# Altium footprint library WE-LAN.PcbLib: 48 footprints (part 2 of 3)
Each footprint in its own frame and in the unit in brackets; x right, y up, seen from the top. Pads: shape width x height; smd on the part's side, far side on the other; paste and mask are expansions set on the pad; w line width, h text height; cw(c..) or ccw(c..) is an arc to the next point about the centre after c.
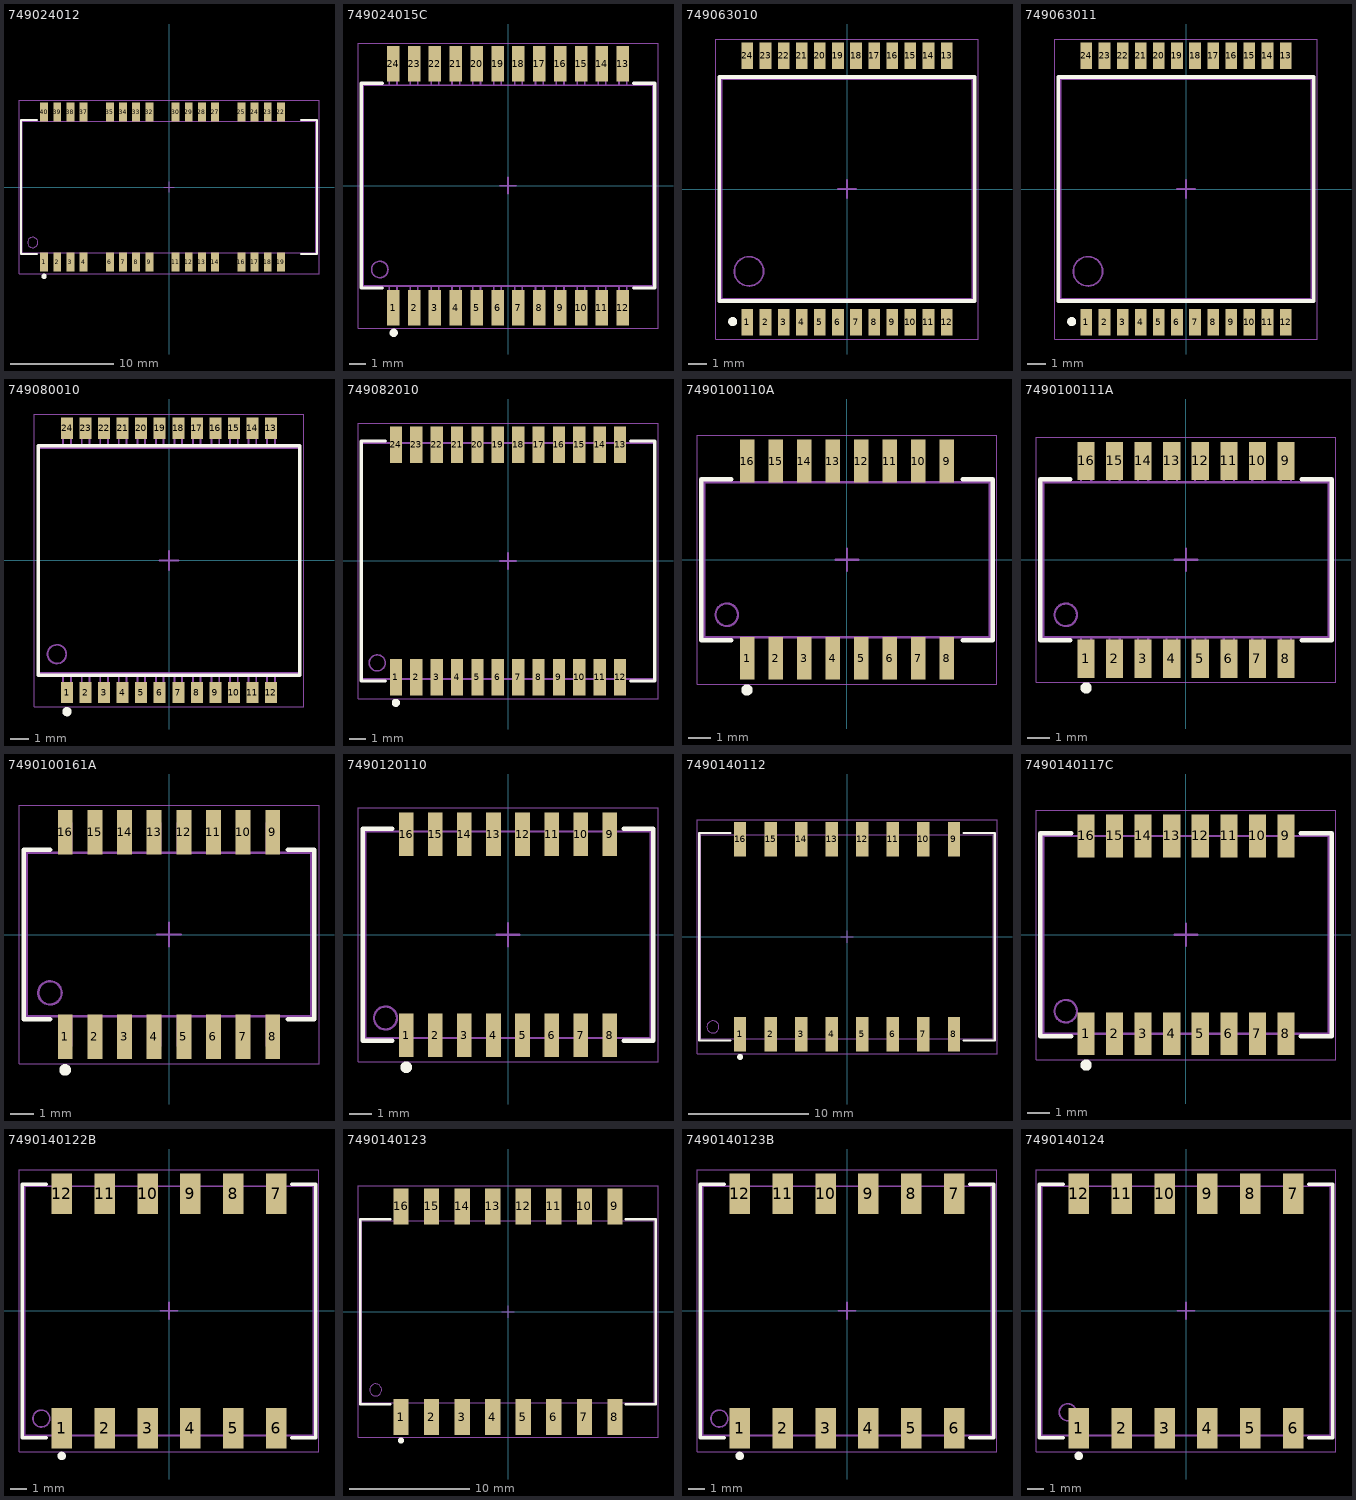
[diagram p1: the footprints below, top view; thin cyan lines are the x and y axes]

## 749024012 [mm] "SMD LAN Transformers, body 28.32x12.7mm, 32-Leads"
height 12.7
pads (32):
  rect 0.76x1.86 smd: 1(-12.06,-7.24) 2(-10.79,-7.24) 3(-9.52,-7.24) 4(-8.25,-7.24) 6(-5.71,-7.24) 7(-4.44,-7.24) 8(-3.17,-7.24) 9(-1.9,-7.24) 11(0.64,-7.24) 12(1.91,-7.24) 13(3.18,-7.24) 14(4.45,-7.24) 16(6.99,-7.24) 17(8.26,-7.24) 18(9.53,-7.24) 19(10.8,-7.24) 22(10.8,7.24) 23(9.53,7.24) 24(8.26,7.24) 25(6.99,7.24) 27(4.45,7.24) 28(3.18,7.24) 29(1.91,7.24) 30(0.64,7.24) 32(-1.9,7.24) 33(-3.17,7.24) 34(-4.44,7.24) 35(-5.71,7.24) 37(-8.25,7.24) 38(-9.52,7.24) 39(-10.79,7.24) 40(-12.06,7.24)
Top Overlay:
  circle w0.25: c-12.06,-8.62 r0.125
  lines w0.2: -12.75,-6.475 -14.285,-6.475 -14.285,6.475 -12.75,6.475 ; 12.75,-6.475 14.285,-6.475 14.285,6.475 12.75,6.475
Top Assembly:
  circle w0.1: c-13.16,-5.35 r0.5
  lines w0.1: -12.285,-6.35 -12.285,-7.745 -11.835,-7.745 -11.835,-6.35 ; -12.285,6.35 -12.285,7.745 -11.835,7.745 -11.835,6.35 ; -11.015,-6.35 -11.015,-7.745 -10.565,-7.745 -10.565,-6.35 ; -11.015,6.35 -11.015,7.745 -10.565,7.745 -10.565,6.35 ; -9.745,-6.35 -9.745,-7.745 -9.295,-7.745 -9.295,-6.35 ; -9.745,6.35 -9.745,7.745 -9.295,7.745 -9.295,6.35 ; -8.475,-6.35 -8.475,-7.745 -8.025,-7.745 -8.025,-6.35 ; -8.475,6.35 -8.475,7.745 -8.025,7.745 -8.025,6.35 ; -5.935,-6.35 -5.935,-7.745 -5.485,-7.745 -5.485,-6.35 ; -5.935,6.35 -5.935,7.745 -5.485,7.745 -5.485,6.35 ; -4.665,-6.35 -4.665,-7.745 -4.215,-7.745 -4.215,-6.35 ; -4.665,6.35 -4.665,7.745 -4.215,7.745 -4.215,6.35 ; -3.395,-6.35 -3.395,-7.745 -2.945,-7.745 -2.945,-6.35 ; -3.395,6.35 -3.395,7.745 -2.945,7.745 -2.945,6.35 ; -2.125,-6.35 -2.125,-7.745 -1.675,-7.745 -1.675,-6.35 ; -2.125,6.35 -2.125,7.745 -1.675,7.745 -1.675,6.35 ; 0.415,-6.35 0.415,-7.745 0.865,-7.745 0.865,-6.35 ; 0.415,6.35 0.415,7.745 0.865,7.745 0.865,6.35 ; 1.685,-6.35 1.685,-7.745 2.135,-7.745 2.135,-6.35 ; 1.685,6.35 1.685,7.745 2.135,7.745 2.135,6.35 ; 2.955,-6.35 2.955,-7.745 3.405,-7.745 3.405,-6.35 ; 2.955,6.35 2.955,7.745 3.405,7.745 3.405,6.35 ; 4.225,-6.35 4.225,-7.745 4.675,-7.745 4.675,-6.35 ; 4.225,6.35 4.225,7.745 4.675,7.745 4.675,6.35 ; 6.765,-6.35 6.765,-7.745 7.215,-7.745 7.215,-6.35 ; 6.765,6.35 6.765,7.745 7.215,7.745 7.215,6.35 ; 8.035,-6.35 8.035,-7.745 8.485,-7.745 8.485,-6.35 ; 8.035,6.35 8.035,7.745 8.485,7.745 8.485,6.35 ; 9.305,-6.35 9.305,-7.745 9.755,-7.745 9.755,-6.35 ; 9.305,6.35 9.305,7.745 9.755,7.745 9.755,6.35 ; 10.575,-6.35 10.575,-7.745 11.025,-7.745 11.025,-6.35 ; 10.575,6.35 10.575,7.745 11.025,7.745 11.025,6.35 ; -14.16,-6.35 -14.16,6.35 14.16,6.35 14.16,-6.35 -14.16,-6.35
Top Designator:
  text ".Designator" at -3.647,-0.357 h1
Top Courtyard:
  lines w0.05: -14.485,-8.37 14.485,-8.37 14.485,8.37 -14.485,8.37 -14.485,-8.37
Top Component Center:
  lines w0.1: -0.5,0 0.5,0 ; 0,-0.5 0,0.5
3D body "749024012.stp": height 12.7, standoff 0, extent -14.285,-7.745 14.285,7.745

## 749024015C [mm] "SMD LAN Transformers, body 17.6x14.2mm, 24-Leads"
height 6
pads (24):
  rect 0.76x2.15 smd: 1(-6.985,-7.425) 2(-5.715,-7.425) 3(-4.445,-7.425) 4(-3.175,-7.425) 5(-1.905,-7.425) 6(-0.635,-7.425) 7(0.635,-7.425) 8(1.905,-7.425) 9(3.175,-7.425) 10(4.445,-7.425) 11(5.715,-7.425) 12(6.985,-7.425) 13(6.985,7.425) 14(5.715,7.425) 15(4.445,7.425) 16(3.175,7.425) 17(1.905,7.425) 18(0.635,7.425) 19(-0.635,7.425) 20(-1.905,7.425) 21(-3.175,7.425) 22(-4.445,7.425) 23(-5.715,7.425) 24(-6.985,7.425)
Top Overlay:
  circle w0.25: c-6.95,-8.95 r0.125
  lines w0.2: -7.65,-6.225 -8.925,-6.225 -8.925,6.225 -7.65,6.225 ; 7.65,-6.225 8.925,-6.225 8.925,6.225 7.65,6.225
Top Assembly:
  circle w0.1: c-7.8,-5.1 r0.5
  lines w0.1: -7.215,-6.1 -7.215,-8 -6.755,-8 -6.755,-6.1 ; -7.215,6.1 -7.215,8 -6.755,8 -6.755,6.1 ; -5.945,-6.1 -5.945,-8 -5.485,-8 -5.485,-6.1 ; -5.945,6.1 -5.945,8 -5.485,8 -5.485,6.1 ; -4.675,-6.1 -4.675,-8 -4.215,-8 -4.215,-6.1 ; -4.675,6.1 -4.675,8 -4.215,8 -4.215,6.1 ; -3.405,-6.1 -3.405,-8 -2.945,-8 -2.945,-6.1 ; -3.405,6.1 -3.405,8 -2.945,8 -2.945,6.1 ; -2.135,-6.1 -2.135,-8 -1.675,-8 -1.675,-6.1 ; -2.135,6.1 -2.135,8 -1.675,8 -1.675,6.1 ; -0.865,-6.1 -0.865,-8 -0.405,-8 -0.405,-6.1 ; -0.865,6.1 -0.865,8 -0.405,8 -0.405,6.1 ; 0.405,-6.1 0.405,-8 0.865,-8 0.865,-6.1 ; 0.405,6.1 0.405,8 0.865,8 0.865,6.1 ; 1.675,-6.1 1.675,-8 2.135,-8 2.135,-6.1 ; 1.675,6.1 1.675,8 2.135,8 2.135,6.1 ; 2.945,-6.1 2.945,-8 3.405,-8 3.405,-6.1 ; 2.945,6.1 2.945,8 3.405,8 3.405,6.1 ; 4.215,-6.1 4.215,-8 4.675,-8 4.675,-6.1 ; 4.215,6.1 4.215,8 4.675,8 4.675,6.1 ; 5.485,-6.1 5.485,-8 5.945,-8 5.945,-6.1 ; 5.485,6.1 5.485,8 5.945,8 5.945,6.1 ; 6.755,-6.1 6.755,-8 7.215,-8 7.215,-6.1 ; 6.755,6.1 6.755,8 7.215,8 7.215,6.1 ; -8.8,-6.1 -8.8,6.1 8.8,6.1 8.8,-6.1 -8.8,-6.1
Top Designator:
  text ".Designator" at -3.647,-0.357 h1
Top Courtyard:
  lines w0.05: -9.125,-8.67 -9.125,8.67 9.125,8.67 9.125,-8.67 -9.125,-8.67
Top Component Center:
  lines w0.1: -0.5,0 0.5,0 ; 0,-0.5 0,0.5
3D body "749024015C.stp": height 6, standoff 0, extent -8.8,-8 8.8,8

## 749063010 [mm] "Transformer, SMT, body 13.72 x 12.00 mm"
height 6.6
pads (24):
  rect 0.64x1.45 smd: 1(-5.445,-7.275) 2(-4.455,-7.275) 3(-3.465,-7.275) 4(-2.475,-7.275) 5(-1.485,-7.275) 6(-0.495,-7.275) 7(0.495,-7.275) 8(1.485,-7.275) 9(2.475,-7.275) 10(3.465,-7.275) 11(4.455,-7.275) 12(5.445,-7.275) 13(5.445,7.275) 14(4.455,7.275) 15(3.465,7.275) 16(2.475,7.275) 17(1.485,7.275) 18(0.495,7.275) 19(-0.495,7.275) 20(-1.485,7.275) 21(-2.475,7.275) 22(-3.465,7.275) 23(-4.455,7.275) 24(-5.445,7.275)
Top Overlay:
  circle w0.25: c-6.25,-7.25 r0.125
  lines w0.2: -6.985,-6.125 6.985,-6.125 6.985,6.125 -6.985,6.125 -6.985,-6.125
Top Assembly:
  circle w0.1: c-5.36,-4.5 r0.8
  lines w0.1: -6.985,-6.125 -6.985,6.125 6.985,6.125 6.985,-6.125 -6.985,-6.125
Top Designator:
  text ".Designator" at -3.647,-0.357 h1
Top 3D Body:
  circle w0.1: c-5.36,-4.5 r0.8
  lines w0.1: -6.86,-6 -6.86,6 6.86,6 6.86,-6 -6.86,-6
Top Courtyard:
  lines w0.05: -7.185,-8.2 -7.185,8.2 7.185,8.2 7.185,-8.2 -7.185,-8.2
Top Component Center:
  lines w0.1: -0.5,0 0.5,0 ; 0,-0.5 0,0.5
3D body "749063010.stp": height 6.27, standoff 0.03, extent -6.802,-7.5 6.802,7.5

## 749063011 [mm] "Transformer, SMT, body 13.60x 12.00 mm"
height 6.25
pads (24):
  rect 0.64x1.45 smd: 1(-5.445,-7.275) 2(-4.455,-7.275) 3(-3.465,-7.275) 4(-2.475,-7.275) 5(-1.485,-7.275) 6(-0.495,-7.275) 7(0.495,-7.275) 8(1.485,-7.275) 9(2.475,-7.275) 10(3.465,-7.275) 11(4.455,-7.275) 12(5.445,-7.275) 13(5.445,7.275) 14(4.455,7.275) 15(3.465,7.275) 16(2.475,7.275) 17(1.485,7.275) 18(0.495,7.275) 19(-0.495,7.275) 20(-1.485,7.275) 21(-2.475,7.275) 22(-3.465,7.275) 23(-4.455,7.275) 24(-5.445,7.275)
Top Overlay:
  circle w0.25: c-6.25,-7.25 r0.125
  lines w0.2: -6.985,-6.125 6.985,-6.125 6.985,6.125 -6.985,6.125 -6.985,-6.125
Top Assembly:
  circle w0.1: c-5.36,-4.5 r0.8
  lines w0.1: -6.985,-6.125 -6.985,6.125 6.985,6.125 6.985,-6.125 -6.985,-6.125
Top Designator:
  text ".Designator" at -3.647,-0.357 h1
Top 3D Body:
  circle w0.1: c-5.36,-4.5 r0.8
  lines w0.1: -6.86,-6 -6.86,6 6.86,6 6.86,-6 -6.86,-6
Top Courtyard:
  lines w0.05: -7.185,-8.2 -7.185,8.2 7.185,8.2 7.185,-8.2 -7.185,-8.2
Top Component Center:
  lines w0.1: -0.5,0 0.5,0 ; 0,-0.5 0,0.5
3D body "749063011.stp": height 6.27, standoff 0.03, extent -6.802,-7.5 6.802,7.5

## 749080010 [mm] "SMD LAN Transformers, body 13.97x12mm, 24-Leads"
height 6.6
pads (24):
  rect 0.64x1.14 smd: 1(-5.445,-7.05) 2(-4.455,-7.05) 3(-3.465,-7.05) 4(-2.475,-7.05) 5(-1.485,-7.05) 6(-0.495,-7.05) 7(0.495,-7.05) 8(1.485,-7.05) 9(2.475,-7.05) 10(3.465,-7.05) 11(4.455,-7.05) 12(5.445,-7.05) 13(5.445,7.05) 14(4.455,7.05) 15(3.465,7.05) 16(2.475,7.05) 17(1.485,7.05) 18(0.495,7.05) 19(-0.495,7.05) 20(-1.485,7.05) 21(-2.475,7.05) 22(-3.465,7.05) 23(-4.455,7.05) 24(-5.445,7.05)
Top Overlay:
  circle w0.25: c-5.445,-8.07 r0.125
  lines w0.2: -6.985,-6.125 6.985,-6.125 6.985,6.125 -6.985,6.125 -6.985,-6.125
Top Assembly:
  circle w0.1: c-5.985,-5 r0.5
  lines w0.1: -5.65,-6 -5.65,-7.555 -5.24,-7.555 -5.24,-6 ; -5.65,6 -5.65,7.555 -5.24,7.555 -5.24,6 ; -4.66,-6 -4.66,-7.555 -4.25,-7.555 -4.25,-6 ; -4.66,6 -4.66,7.555 -4.25,7.555 -4.25,6 ; -3.67,-6 -3.67,-7.555 -3.26,-7.555 -3.26,-6 ; -3.67,6 -3.67,7.555 -3.26,7.555 -3.26,6 ; -2.68,-6 -2.68,-7.555 -2.27,-7.555 -2.27,-6 ; -2.68,6 -2.68,7.555 -2.27,7.555 -2.27,6 ; -1.69,-6 -1.69,-7.555 -1.28,-7.555 -1.28,-6 ; -1.69,6 -1.69,7.555 -1.28,7.555 -1.28,6 ; -0.7,-6 -0.7,-7.555 -0.29,-7.555 -0.29,-6 ; -0.7,6 -0.7,7.555 -0.29,7.555 -0.29,6 ; 0.29,-6 0.29,-7.555 0.7,-7.555 0.7,-6 ; 0.29,6 0.29,7.555 0.7,7.555 0.7,6 ; 1.28,-6 1.28,-7.555 1.69,-7.555 1.69,-6 ; 1.28,6 1.28,7.555 1.69,7.555 1.69,6 ; 2.27,-6 2.27,-7.555 2.68,-7.555 2.68,-6 ; 2.27,6 2.27,7.555 2.68,7.555 2.68,6 ; 3.26,-6 3.26,-7.555 3.67,-7.555 3.67,-6 ; 3.26,6 3.26,7.555 3.67,7.555 3.67,6 ; 4.25,-6 4.25,-7.555 4.66,-7.555 4.66,-6 ; 4.25,6 4.25,7.555 4.66,7.555 4.66,6 ; 5.24,-6 5.24,-7.555 5.65,-7.555 5.65,-6 ; 5.24,6 5.24,7.555 5.65,7.555 5.65,6 ; -6.985,-6 -6.985,6 6.985,6 6.985,-6 -6.985,-6
Top Designator:
  text ".Designator" at -3.647,-0.357 h1
Top Courtyard:
  lines w0.05: -7.185,-7.82 7.185,-7.82 7.185,7.82 -7.185,7.82 -7.185,-7.82
Top Component Center:
  lines w0.1: -0.5,0 0.5,0 ; 0,-0.5 0,0.5
3D body "749080010.stp": height 6.2, standoff 0, extent -6.985,-7.555 6.985,7.555

## 749082010 [mm] "SMD LAN Transformers, body 18.29x14.7mm, 24-Leads"
height 8.8
pads (24):
  rect 0.76x2.29 smd: 1(-6.985,-7.24) 2(-5.715,-7.24) 3(-4.445,-7.24) 4(-3.175,-7.24) 5(-1.905,-7.24) 6(-0.635,-7.24) 7(0.635,-7.24) 8(1.905,-7.24) 9(3.175,-7.24) 10(4.445,-7.24) 11(5.715,-7.24) 12(6.985,-7.24) 13(6.985,7.24) 14(5.715,7.24) 15(4.445,7.24) 16(3.175,7.24) 17(1.905,7.24) 18(0.635,7.24) 19(-0.635,7.24) 20(-1.905,7.24) 21(-3.175,7.24) 22(-4.445,7.24) 23(-5.715,7.24) 24(-6.985,7.24)
Top Overlay:
  circle w0.25: c-6.985,-8.835 r0.125
  lines w0.2: -7.65,-7.475 -9.145,-7.475 -9.145,7.475 -7.65,7.475 ; 7.65,-7.475 9.145,-7.475 9.145,7.475 7.65,7.475
Top Assembly:
  circle w0.1: c-8.145,-6.35 r0.5
  lines w0.1: -7.24,-7.35 -7.24,-8 -6.73,-8 -6.73,-7.35 ; -7.24,7.35 -7.24,8 -6.73,8 -6.73,7.35 ; -5.97,-7.35 -5.97,-8 -5.46,-8 -5.46,-7.35 ; -5.97,7.35 -5.97,8 -5.46,8 -5.46,7.35 ; -4.7,-7.35 -4.7,-8 -4.19,-8 -4.19,-7.35 ; -4.7,7.35 -4.7,8 -4.19,8 -4.19,7.35 ; -3.43,-7.35 -3.43,-8 -2.92,-8 -2.92,-7.35 ; -3.43,7.35 -3.43,8 -2.92,8 -2.92,7.35 ; -2.16,-7.35 -2.16,-8 -1.65,-8 -1.65,-7.35 ; -2.16,7.35 -2.16,8 -1.65,8 -1.65,7.35 ; -0.89,-7.35 -0.89,-8 -0.38,-8 -0.38,-7.35 ; -0.89,7.35 -0.89,8 -0.38,8 -0.38,7.35 ; 0.38,-7.35 0.38,-8 0.89,-8 0.89,-7.35 ; 0.38,7.35 0.38,8 0.89,8 0.89,7.35 ; 1.65,-7.35 1.65,-8 2.16,-8 2.16,-7.35 ; 1.65,7.35 1.65,8 2.16,8 2.16,7.35 ; 2.92,-7.35 2.92,-8 3.43,-8 3.43,-7.35 ; 2.92,7.35 2.92,8 3.43,8 3.43,7.35 ; 4.19,-7.35 4.19,-8 4.7,-8 4.7,-7.35 ; 4.19,7.35 4.19,8 4.7,8 4.7,7.35 ; 5.46,-7.35 5.46,-8 5.97,-8 5.97,-7.35 ; 5.46,7.35 5.46,8 5.97,8 5.97,7.35 ; 6.73,-7.35 6.73,-8 7.24,-8 7.24,-7.35 ; 6.73,7.35 6.73,8 7.24,8 7.24,7.35 ; -9.145,-7.35 -9.145,7.35 9.145,7.35 9.145,-7.35 -9.145,-7.35
Top Designator:
  text ".Designator" at -3.647,-0.357 h1
Top Courtyard:
  lines w0.05: -9.345,-8.585 -9.345,8.585 9.345,8.585 9.345,-8.585 -9.345,-8.585
Top Component Center:
  lines w0.1: -0.5,0 0.5,0 ; 0,-0.5 0,0.5
3D body "749082010.stp": height 8.7, standoff 0, extent -8.75,-8 8.75,8

## 7490100110A [mm] "SMD LAN Transformers, body 12.7x8.8mm, 16-Leads"
height 6.35
pads (16):
  rect 0.64x1.91 smd: 1(-4.445,-4.385) 2(-3.175,-4.385) 3(-1.905,-4.385) 4(-0.635,-4.385) 5(0.635,-4.385) 6(1.905,-4.385) 7(3.175,-4.385) 8(4.445,-4.385) 9(4.445,4.385) 10(3.175,4.385) 11(1.905,4.385) 12(0.635,4.385) 13(-0.635,4.385) 14(-1.905,4.385) 15(-3.175,4.385) 16(-4.445,4.385)
Top Overlay:
  circle w0.25: c-4.45,-5.8 r0.125
  lines w0.2: -5.15,-3.575 -6.475,-3.575 -6.475,3.575 -5.15,3.575 ; 5.15,-3.575 6.475,-3.575 6.475,3.575 5.15,3.575
Top Assembly:
  circle w0.1: c-5.35,-2.45 r0.5
  lines w0.1: -4.675,-3.45 -4.675,-4.7 -4.215,-4.7 -4.215,-3.45 ; -4.675,3.45 -4.675,4.7 -4.215,4.7 -4.215,3.45 ; -3.405,-3.45 -3.405,-4.7 -2.945,-4.7 -2.945,-3.45 ; -3.405,3.45 -3.405,4.7 -2.945,4.7 -2.945,3.45 ; -2.135,-3.45 -2.135,-4.7 -1.675,-4.7 -1.675,-3.45 ; -2.135,3.45 -2.135,4.7 -1.675,4.7 -1.675,3.45 ; -0.865,-3.45 -0.865,-4.7 -0.405,-4.7 -0.405,-3.45 ; -0.865,3.45 -0.865,4.7 -0.405,4.7 -0.405,3.45 ; 0.405,-3.45 0.405,-4.7 0.865,-4.7 0.865,-3.45 ; 0.405,3.45 0.405,4.7 0.865,4.7 0.865,3.45 ; 1.675,-3.45 1.675,-4.7 2.135,-4.7 2.135,-3.45 ; 1.675,3.45 1.675,4.7 2.135,4.7 2.135,3.45 ; 2.945,-3.45 2.945,-4.7 3.405,-4.7 3.405,-3.45 ; 2.945,3.45 2.945,4.7 3.405,4.7 3.405,3.45 ; 4.215,-3.45 4.215,-4.7 4.675,-4.7 4.675,-3.45 ; 4.215,3.45 4.215,4.7 4.675,4.7 4.675,3.45 ; -6.35,-3.45 -6.35,3.45 6.35,3.45 6.35,-3.45 -6.35,-3.45
Top Designator:
  text ".Designator" at -3.647,-0.357 h1
Top Courtyard:
  lines w0.05: -6.675,-5.54 6.675,-5.54 6.675,5.54 -6.675,5.54 -6.675,-5.54
Top Component Center:
  lines w0.1: -0.5,0 0.5,0 ; 0,-0.5 0,0.5
3D body "7490100110A.stp": height 5.67, standoff 0.02, extent -6.35,-4.7 6.35,4.7

## 7490100111A [mm] "SMD LAN Transformers, body 12.7x8.8mm, 16-Leads"
height 6.35
pads (16):
  rect 0.76x1.7 smd: 1(-4.445,-4.4) 2(-3.175,-4.4) 3(-1.905,-4.4) 4(-0.635,-4.4) 5(0.635,-4.4) 6(1.905,-4.4) 7(3.175,-4.4) 8(4.445,-4.4) 9(4.445,4.4) 10(3.175,4.4) 11(1.905,4.4) 12(0.635,4.4) 13(-0.635,4.4) 14(-1.905,4.4) 15(-3.175,4.4) 16(-4.445,4.4)
Top Overlay:
  circle w0.25: c-4.445,-5.7 r0.125
  lines w0.2: -5.15,-3.575 -6.475,-3.575 -6.475,3.575 -5.15,3.575 ; 5.15,-3.575 6.475,-3.575 6.475,3.575 5.15,3.575
Top Assembly:
  circle w0.1: c-5.35,-2.45 r0.5
  lines w0.1: -4.675,-3.45 -4.675,-4.7 -4.215,-4.7 -4.215,-3.45 ; -4.675,3.45 -4.675,4.7 -4.215,4.7 -4.215,3.45 ; -3.405,-3.45 -3.405,-4.7 -2.945,-4.7 -2.945,-3.45 ; -3.405,3.45 -3.405,4.7 -2.945,4.7 -2.945,3.45 ; -2.135,-3.45 -2.135,-4.7 -1.675,-4.7 -1.675,-3.45 ; -2.135,3.45 -2.135,4.7 -1.675,4.7 -1.675,3.45 ; -0.865,-3.45 -0.865,-4.7 -0.405,-4.7 -0.405,-3.45 ; -0.865,3.45 -0.865,4.7 -0.405,4.7 -0.405,3.45 ; 0.405,-3.45 0.405,-4.7 0.865,-4.7 0.865,-3.45 ; 0.405,3.45 0.405,4.7 0.865,4.7 0.865,3.45 ; 1.675,-3.45 1.675,-4.7 2.135,-4.7 2.135,-3.45 ; 1.675,3.45 1.675,4.7 2.135,4.7 2.135,3.45 ; 2.945,-3.45 2.945,-4.7 3.405,-4.7 3.405,-3.45 ; 2.945,3.45 2.945,4.7 3.405,4.7 3.405,3.45 ; 4.215,-3.45 4.215,-4.7 4.675,-4.7 4.675,-3.45 ; 4.215,3.45 4.215,4.7 4.675,4.7 4.675,3.45 ; -6.35,-3.45 6.35,-3.45 6.35,3.45 -6.35,3.45 -6.35,-3.45
Top Designator:
  text ".Designator" at -3.647,-0.357 h1
Top Courtyard:
  lines w0.05: -6.675,-5.45 6.675,-5.45 6.675,5.45 -6.675,5.45 -6.675,-5.45
Top Component Center:
  lines w0.1: -0.5,0 0.5,0 ; 0,-0.5 0,0.5
3D body "7490100111A.stp": height 5.67, standoff 0.02, extent -6.35,-4.76 6.35,4.76

## 7490100161A [mm] "SMD LAN Transformers, body 12.7x8.8mm, 16-Leads"
height 6.35
pads (16):
  rect 0.64x1.91 smd: 1(-4.445,-4.385) 2(-3.175,-4.385) 3(-1.905,-4.385) 4(-0.635,-4.385) 5(0.635,-4.385) 6(1.905,-4.385) 7(3.175,-4.385) 8(4.445,-4.385) 9(4.445,4.385) 10(3.175,4.385) 11(1.905,4.385) 12(0.635,4.385) 13(-0.635,4.385) 14(-1.905,4.385) 15(-3.175,4.385) 16(-4.445,4.385)
Top Overlay:
  circle w0.25: c-4.45,-5.8 r0.125
  lines w0.2: -5.1,-3.625 -6.225,-3.625 -6.225,3.625 -5.1,3.625 ; 5.1,-3.625 6.225,-3.625 6.225,3.625 5.1,3.625
Top Assembly:
  circle w0.1: c-5.1,-2.5 r0.5
  lines w0.1: -4.7,-3.5 -4.7,-4.76 -4.19,-4.76 -4.19,-3.5 ; -4.7,3.5 -4.7,4.76 -4.19,4.76 -4.19,3.5 ; -3.43,-3.5 -3.43,-4.76 -2.92,-4.76 -2.92,-3.5 ; -3.43,3.5 -3.43,4.76 -2.92,4.76 -2.92,3.5 ; -2.16,-3.5 -2.16,-4.76 -1.65,-4.76 -1.65,-3.5 ; -2.16,3.5 -2.16,4.76 -1.65,4.76 -1.65,3.5 ; -0.89,-3.5 -0.89,-4.76 -0.38,-4.76 -0.38,-3.5 ; -0.89,3.5 -0.89,4.76 -0.38,4.76 -0.38,3.5 ; 0.38,-3.5 0.38,-4.76 0.89,-4.76 0.89,-3.5 ; 0.38,3.5 0.38,4.76 0.89,4.76 0.89,3.5 ; 1.65,-3.5 1.65,-4.76 2.16,-4.76 2.16,-3.5 ; 1.65,3.5 1.65,4.76 2.16,4.76 2.16,3.5 ; 2.92,-3.5 2.92,-4.76 3.43,-4.76 3.43,-3.5 ; 2.92,3.5 2.92,4.76 3.43,4.76 3.43,3.5 ; 4.19,-3.5 4.19,-4.76 4.7,-4.76 4.7,-3.5 ; 4.19,3.5 4.19,4.76 4.7,4.76 4.7,3.5 ; -6.1,-3.5 -6.1,3.5 6.1,3.5 6.1,-3.5 -6.1,-3.5
Top Designator:
  text ".Designator" at -3.647,-0.357 h1
Top Courtyard:
  lines w0.05: -6.425,-5.54 -6.425,5.54 6.425,5.54 6.425,-5.54 -6.425,-5.54
Top Component Center:
  lines w0.1: -0.5,0 0.5,0 ; 0,-0.5 0,0.5
3D body "7490100161A.stp": height 5.4, standoff 0, extent -6.1,-4.76 6.1,4.76

## 7490120110 [mm] "SMD LAN Transformers, body 12.45x9.02mm, 16-Leads"
height 5.6
pads (16):
  rect 0.64x1.9 smd: 1(-4.445,-4.385) 2(-3.175,-4.385) 3(-1.905,-4.385) 4(-0.635,-4.385) 5(0.635,-4.385) 6(1.905,-4.385) 7(3.175,-4.385) 8(4.445,-4.385) 9(4.445,4.385) 10(3.175,4.385) 11(1.905,4.385) 12(0.635,4.385) 13(-0.635,4.385) 14(-1.905,4.385) 15(-3.175,4.385) 16(-4.445,4.385)
Top Overlay:
  circle w0.25: c-4.445,-5.785 r0.125
  lines w0.2: -5.05,-4.635 -6.35,-4.635 -6.35,4.635 -5.05,4.635 ; 5.05,-4.635 6.35,-4.635 6.35,4.635 5.05,4.635
Top Assembly:
  circle w0.1: c-5.35,-3.635 r0.5
  lines w0.1: -6.225,-4.51 6.225,-4.51 6.225,4.51 -6.225,4.51 -6.225,-4.51
Top Designator:
  text ".Designator" at -3.647,-0.357 h1
Top Courtyard:
  lines w0.05: -6.55,-5.54 6.55,-5.54 6.55,5.54 -6.55,5.54 -6.55,-5.54
Top Component Center:
  lines w0.1: -0.5,0 0.5,0 ; 0,-0.5 0,0.5
3D body "7490120110.stp": height 5.55, standoff 0, extent -6.35,-4.95 6.35,4.95

## 7490140112 [mm] "SMD LAN Transformers, body 24.3x17mm, 16-Leads"
height 10.85
pads (16):
  rect 1.02x2.87 smd: 1(-8.89,-8.115) 2(-6.35,-8.115) 3(-3.81,-8.115) 4(-1.27,-8.115) 5(1.27,-8.115) 6(3.81,-8.115) 7(6.35,-8.115) 8(8.89,-8.115) 9(8.89,8.115) 10(6.35,8.115) 11(3.81,8.115) 12(1.27,8.115) 13(-1.27,8.115) 14(-3.81,8.115) 15(-6.35,8.115) 16(-8.89,8.115)
Top Overlay:
  circle w0.25: c-8.89,-10 r0.125
  lines w0.2: -9.7,-8.625 -12.275,-8.625 -12.275,8.625 -9.7,8.625 ; 9.7,-8.625 12.275,-8.625 12.275,8.625 9.7,8.625
Top Assembly:
  circle w0.1: c-11.15,-7.5 r0.5
  lines w0.1: -12.15,-8.5 12.15,-8.5 12.15,8.5 -12.15,8.5 -12.15,-8.5
Top Designator:
  text ".Designator" at -3.647,-0.357 h1
Top Courtyard:
  lines w0.05: -12.475,-9.75 -12.475,9.75 12.475,9.75 12.475,-9.75 -12.475,-9.75
Top Component Center:
  lines w0.1: -0.5,0 0.5,0 ; 0,-0.5 0,0.5
3D body "7490140112.stp": height 10.85, standoff 0, extent -12.275,-9.125 12.275,9.125

## 7490140117C [mm] "SMD LAN Transformers, body 12.7x8.8mm, 16-Leads"
height 6
pads (16):
  rect 0.76x1.9 smd: 1(-4.445,-4.4) 2(-3.175,-4.4) 3(-1.905,-4.4) 4(-0.635,-4.4) 5(0.635,-4.4) 6(1.905,-4.4) 7(3.175,-4.4) 8(4.445,-4.4) 9(4.445,4.4) 10(3.175,4.4) 11(1.905,4.4) 12(0.635,4.4) 13(-0.635,4.4) 14(-1.905,4.4) 15(-3.175,4.4) 16(-4.445,4.4)
Top Overlay:
  circle w0.25: c-4.445,-5.8 r0.125
  lines w0.2: -5.1,-4.525 -6.475,-4.525 -6.475,4.525 -5.1,4.525 ; 5.1,-4.525 6.475,-4.525 6.475,4.525 5.1,4.525
Top Assembly:
  circle w0.1: c-5.35,-3.4 r0.5
  lines w0.1: -6.35,-4.4 6.35,-4.4 6.35,4.4 -6.35,4.4 -6.35,-4.4
Top Designator:
  text ".Designator" at -3.647,-0.357 h1
Top Courtyard:
  lines w0.05: -6.675,-5.55 -6.675,5.55 6.675,5.55 6.675,-5.55 -6.675,-5.55
Top Component Center:
  lines w0.1: -0.5,0 0.5,0 ; 0,-0.5 0,0.5
3D body "7490140117C.stp": height 5.8, standoff 0, extent -6.35,-4.7 6.35,4.7

## 7490140122B [mm] "SMD LAN Transformers, body 17.1x14.75mm, 12-Leads"
height 8.65
pads (12):
  rect 1.21x2.4 smd: 1(-6.35,-6.935) 2(-3.81,-6.935) 3(-1.27,-6.935) 4(1.27,-6.935) 5(3.81,-6.935) 6(6.35,-6.935) 7(6.35,6.935) 8(3.81,6.935) 9(1.27,6.935) 10(-1.27,6.935) 11(-3.81,6.935) 12(-6.35,6.935)
Top Overlay:
  circle w0.25: c-6.35,-8.585 r0.125
  lines w0.2: -7.25,-7.5 -8.675,-7.5 -8.675,7.5 -7.25,7.5 ; 7.25,-7.5 8.675,-7.5 8.675,7.5 7.25,7.5
Top Assembly:
  circle w0.1: c-7.55,-6.375 r0.5
  lines w0.1: -8.55,-7.375 8.55,-7.375 8.55,7.375 -8.55,7.375 -8.55,-7.375
Top Designator:
  text ".Designator" at -3.647,-0.357 h1
Top Courtyard:
  lines w0.05: -8.875,-8.335 -8.875,8.335 8.875,8.335 8.875,-8.335 -8.875,-8.335
Top Component Center:
  lines w0.1: -0.5,0 0.5,0 ; 0,-0.5 0,0.5
3D body "7490140122B.stp": height 8.4, standoff 0, extent -8.55,-7.62 8.55,7.62

## 7490140123 [mm] "SMD LAN Transformers, body 24.28x15.1mm, 16-Leads"
height 11
pads (16):
  rect 1.27x3 smd: 1(-8.89,-8.75) 2(-6.35,-8.75) 3(-3.81,-8.75) 4(-1.27,-8.75) 5(1.27,-8.75) 6(3.81,-8.75) 7(6.35,-8.75) 8(8.89,-8.75) 9(8.89,8.75) 10(6.35,8.75) 11(3.81,8.75) 12(1.27,8.75) 13(-1.27,8.75) 14(-3.81,8.75) 15(-6.35,8.75) 16(-8.89,8.75)
Top Overlay:
  circle w0.25: c-8.89,-10.7 r0.125
  lines w0.2: -9.8,-7.675 -12.265,-7.675 -12.265,7.675 -9.8,7.675 ; 9.8,-7.675 12.265,-7.675 12.265,7.675 9.8,7.675
Top Assembly:
  circle w0.1: c-11,-6.5 r0.5
  lines w0.1: -9.265,-7.55 -9.265,-9.35 -8.515,-9.35 -8.515,-7.55 ; -9.265,7.55 -9.265,9.35 -8.515,9.35 -8.515,7.55 ; -6.725,-7.55 -6.725,-9.35 -5.975,-9.35 -5.975,-7.55 ; -6.725,7.55 -6.725,9.35 -5.975,9.35 -5.975,7.55 ; -4.185,-7.55 -4.185,-9.35 -3.435,-9.35 -3.435,-7.55 ; -4.185,7.55 -4.185,9.35 -3.435,9.35 -3.435,7.55 ; -1.645,-7.55 -1.645,-9.35 -0.895,-9.35 -0.895,-7.55 ; -1.645,7.55 -1.645,9.35 -0.895,9.35 -0.895,7.55 ; 0.895,-7.55 0.895,-9.35 1.645,-9.35 1.645,-7.55 ; 0.895,7.55 0.895,9.35 1.645,9.35 1.645,7.55 ; 3.435,-7.55 3.435,-9.35 4.185,-9.35 4.185,-7.55 ; 3.435,7.55 3.435,9.35 4.185,9.35 4.185,7.55 ; 5.975,-7.55 5.975,-9.35 6.725,-9.35 6.725,-7.55 ; 5.975,7.55 5.975,9.35 6.725,9.35 6.725,7.55 ; 8.515,-7.55 8.515,-9.35 9.265,-9.35 9.265,-7.55 ; 8.515,7.55 8.515,9.35 9.265,9.35 9.265,7.55 ; -12.14,-7.55 12.14,-7.55 12.14,7.55 -12.14,7.55 -12.14,-7.55
Top Designator:
  text ".Designator" at -3.647,-0.357 h1
Top Courtyard:
  lines w0.05: -12.465,-10.45 12.465,-10.45 12.465,10.45 -12.465,10.45 -12.465,-10.45
Top Component Center:
  lines w0.1: -0.5,0 0.5,0 ; 0,-0.5 0,0.5
3D body "7490140123.stp": height 10, standoff 0, extent -12.075,-9.3 12.075,9.3

## 7490140123B [mm] "SMD LAN Transformers, body 17.1x14.75mm, 12-Leads"
height 8.65
pads (12):
  rect 1.21x2.4 smd: 1(-6.35,-6.935) 2(-3.81,-6.935) 3(-1.27,-6.935) 4(1.27,-6.935) 5(3.81,-6.935) 6(6.35,-6.935) 7(6.35,6.935) 8(3.81,6.935) 9(1.27,6.935) 10(-1.27,6.935) 11(-3.81,6.935) 12(-6.35,6.935)
Top Overlay:
  circle w0.25: c-6.35,-8.585 r0.125
  lines w0.2: -7.25,-7.5 -8.675,-7.5 -8.675,7.5 -7.25,7.5 ; 7.25,-7.5 8.675,-7.5 8.675,7.5 7.25,7.5
Top Assembly:
  circle w0.1: c-7.55,-6.375 r0.5
  lines w0.1: -8.55,-7.375 8.55,-7.375 8.55,7.375 -8.55,7.375 -8.55,-7.375
Top Designator:
  text ".Designator" at -3.647,-0.357 h1
Top Courtyard:
  lines w0.05: -8.875,-8.335 -8.875,8.335 8.875,8.335 8.875,-8.335 -8.875,-8.335
Top Component Center:
  lines w0.1: -0.5,0 0.5,0 ; 0,-0.5 0,0.5
3D body "7490140123B.stp": height 8.4, standoff 0, extent -8.55,-7.62 8.55,7.62

## 7490140124 [mm] "SMD LAN Transformers, body 17.1x14.75mm, 12-Leads"
height 8.65
pads (12):
  rect 1.21x2.4 smd: 1(-6.35,-6.935) 2(-3.81,-6.935) 3(-1.27,-6.935) 4(1.27,-6.935) 5(3.81,-6.935) 6(6.35,-6.935) 7(6.35,6.935) 8(3.81,6.935) 9(1.27,6.935) 10(-1.27,6.935) 11(-3.81,6.935) 12(-6.35,6.935)
Top Overlay:
  circle w0.25: c-6.35,-8.585 r0.125
  lines w0.2: -7.25,-7.5 -8.675,-7.5 -8.675,7.5 -7.25,7.5 ; 7.25,-7.5 8.675,-7.5 8.675,7.5 7.25,7.5
Top Assembly:
  circle w0.1: c-7,-6 r0.5
  lines w0.1: -8.55,-7.375 -8.55,7.375 8.55,7.375 8.55,-7.375 -8.55,-7.375
Top Designator:
  text ".Designator" at -3.647,-0.357 h1
Top Courtyard:
  lines w0.05: -8.875,-8.335 -8.875,8.335 8.875,8.335 8.875,-8.335 -8.875,-8.335
Top Component Center:
  lines w0.1: -0.5,0 0.5,0 ; 0,-0.5 0,0.5
3D body "7490140124.stp": height 8.4, standoff 0, extent -8.55,-7.62 8.55,7.62